# Altium schematic symbol library TSW-104-07-S-S-LL.SchLib: 1 symbol
Pins are listed as number, name and electrical type; pins without a type are passive.

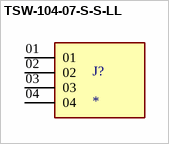
[diagram p0: symbol TSW-104-07-S-S-LL]

## TSW-104-07-S-S-LL
designator J?
MP: TSW-104-07-S-S-LL; Package: None; Price: None; Value: *; Availability: Unavailable
footprint SAMTEC_TSW-104-07-S-S-LL
pins: 01, 02, 03, 04